# Altium footprint library Package_DFN_QFN.PcbLib: 735 footprints (part 32 of 46)
Each footprint in its own frame and in the unit in brackets; x right, y up, seen from the top. Pads: shape width x height; smd on the part's side, far side on the other; paste and mask are expansions set on the pad; w line width, h text height; cw(c..) or ccw(c..) is an arc to the next point about the centre after c.
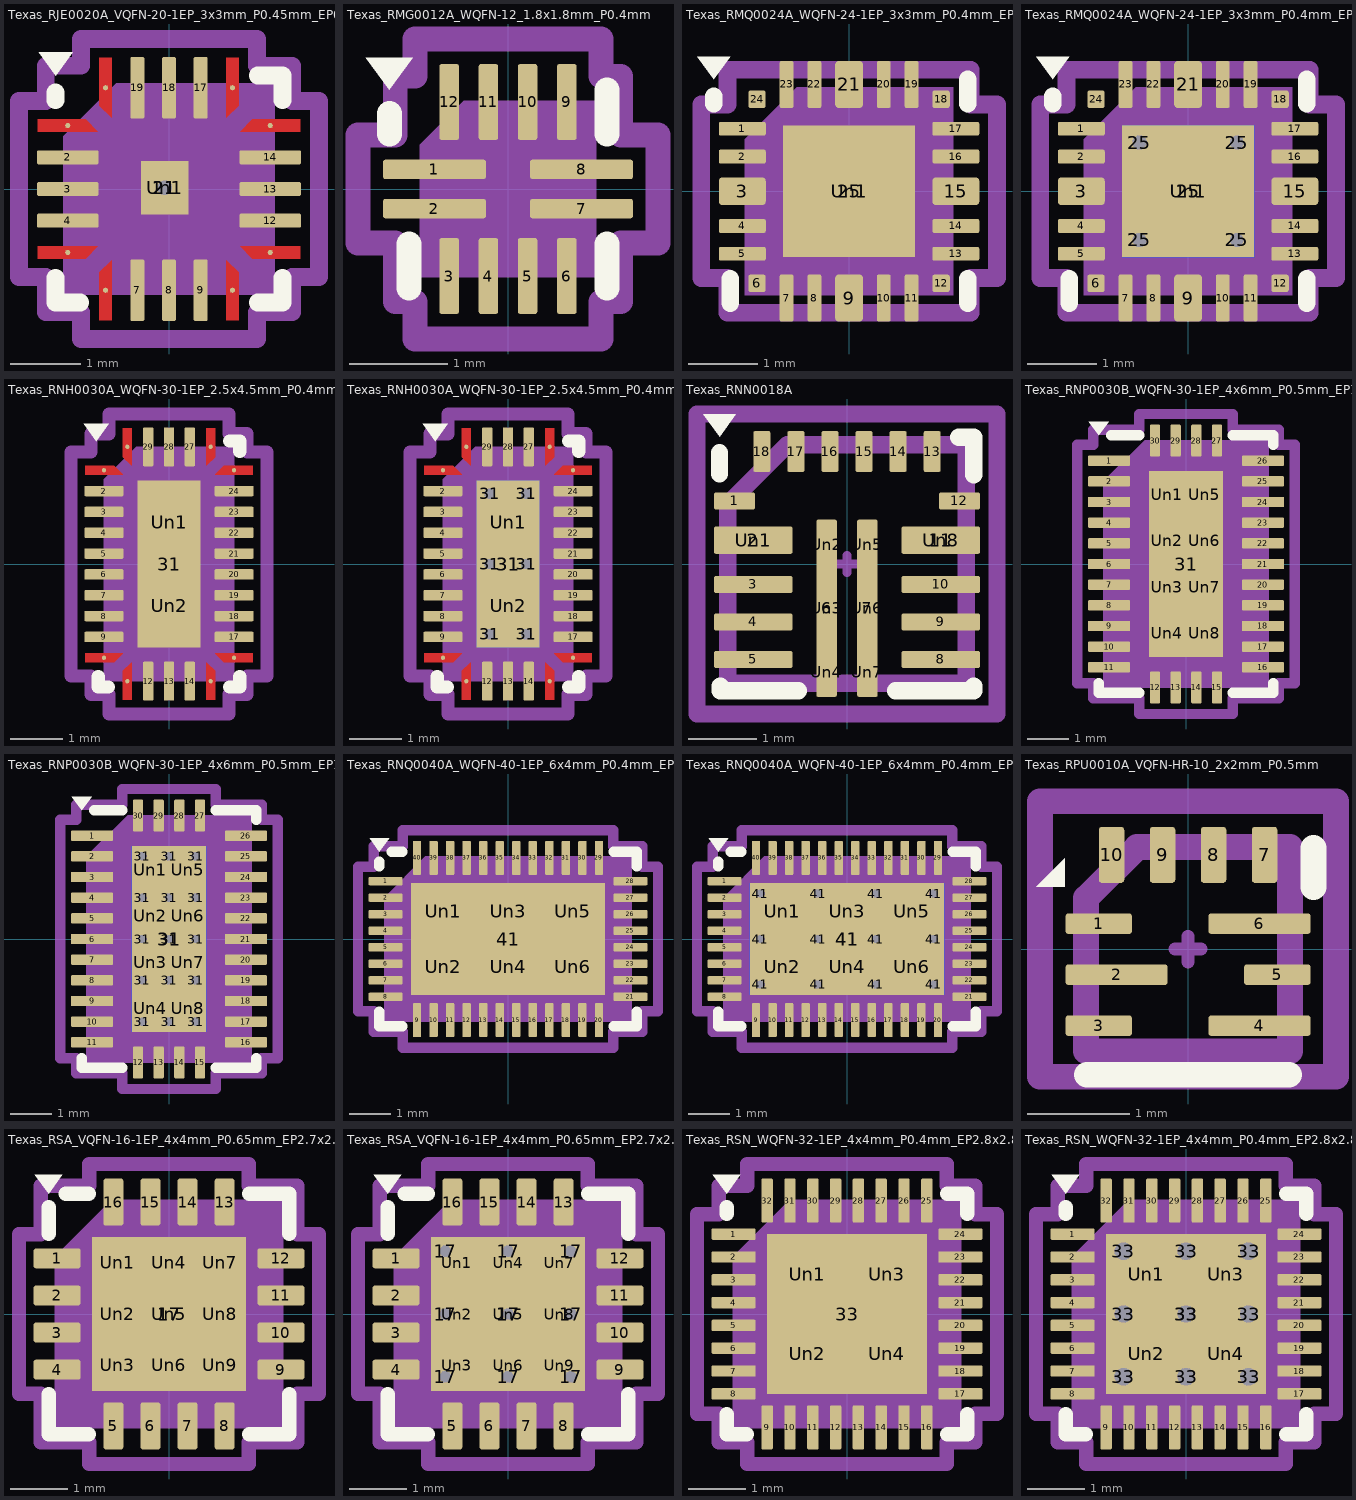
[diagram p31: the footprints below, top view; thin cyan lines are the x and y axes]

## Texas_RJE0020A_VQFN-20-1EP_3x3mm_P0.45mm_EP0.675x0.76mm_ThermalVias [mm] "Texas_RJE0020A_VQFN-20-1EP_3x3mm_P0.45mm_EP0.675x0.76mm_ThermalVias"
pads (24):
  round 0.073 smd: 1(-1.438,0.9) 5(-1.438,-0.9) 6(-0.9,-1.438) 10(0.9,-1.438) 11(1.438,-0.9) 15(1.438,0.9) 16(0.9,1.438) 20(-0.9,1.438)
  rrect25% 0.875x0.2 smd: 2(-1.438,0.45) 3(-1.438,0) 4(-1.438,-0.45) 12(1.438,-0.45) 13(1.438,0) 14(1.438,0.45)
  rrect25% 0.2x0.875 smd: 7(-0.45,-1.438) 8(0,-1.438) 9(0.45,-1.438) 17(0.45,1.438) 18(0,1.438) 19(-0.45,1.438)
  rect 0.675x0.76 smd: 21(-0.06,0.018)
  round 0.5 hole 0.2: 21(-0.06,0.018)
  rect 0.5x0.5 smd far side: 21(-0.06,0.018)
  rrect25% 0.64x0.72 on Top Paste: Un1(-0.06,0.018)
F.Cu:
  region: -1.01,0.816 -1.01,0.81 -1.865,0.81 -1.865,0.99 -1.184,0.99
  region: -1.01,-0.816 -1.184,-0.99 -1.865,-0.99 -1.865,-0.81 -1.01,-0.81
  region: -0.81,-1.865 -0.99,-1.865 -0.99,-1.184 -0.816,-1.01 -0.81,-1.01
  region: 0.99,-1.184 0.99,-1.865 0.81,-1.865 0.81,-1.01 0.816,-1.01
  region: 1.865,-0.99 1.184,-0.99 1.01,-0.816 1.01,-0.81 1.865,-0.81
  region: 1.865,0.81 1.01,0.81 1.01,0.816 1.184,0.99 1.865,0.99
  region: 0.99,1.184 0.816,1.01 0.81,1.01 0.81,1.865 0.99,1.865
  region: -0.81,1.01 -0.816,1.01 -0.99,1.184 -0.99,1.865 -0.81,1.865
F.SilkS:
  region: -1.61,1.61 -1.85,1.94 -1.37,1.94
  lines w0.254: -1.61,-1.26 -1.61,-1.61 -1.26,-1.61 ; -1.61,1.26 -1.61,1.37 ; 1.26,-1.61 1.61,-1.61 1.61,-1.26 ; 1.26,1.61 1.61,1.61 1.61,1.26
F.Paste:
  region: -1.01,0.816 -1.01,0.81 -1.865,0.81 -1.865,0.99 -1.184,0.99
  region: -1.01,-0.816 -1.184,-0.99 -1.865,-0.99 -1.865,-0.81 -1.01,-0.81
  region: -0.81,-1.865 -0.99,-1.865 -0.99,-1.184 -0.816,-1.01 -0.81,-1.01
  region: 0.99,-1.184 0.99,-1.865 0.81,-1.865 0.81,-1.01 0.816,-1.01
  region: 1.865,-0.99 1.184,-0.99 1.01,-0.816 1.01,-0.81 1.865,-0.81
  region: 1.865,0.81 1.01,0.81 1.01,0.816 1.184,0.99 1.865,0.99
  region: 0.99,1.184 0.816,1.01 0.81,1.01 0.81,1.865 0.99,1.865
  region: -0.81,1.01 -0.816,1.01 -0.99,1.184 -0.99,1.865 -0.81,1.865
F.Mask:
  region: -1.01,0.816 -1.01,0.81 -1.865,0.81 -1.865,0.99 -1.184,0.99
  region: -1.01,-0.816 -1.184,-0.99 -1.865,-0.99 -1.865,-0.81 -1.01,-0.81
  region: -0.81,-1.865 -0.99,-1.865 -0.99,-1.184 -0.816,-1.01 -0.81,-1.01
  region: 0.99,-1.184 0.99,-1.865 0.81,-1.865 0.81,-1.01 0.816,-1.01
  region: 1.865,-0.99 1.184,-0.99 1.01,-0.816 1.01,-0.81 1.865,-0.81
  region: 1.865,0.81 1.01,0.81 1.01,0.816 1.184,0.99 1.865,0.99
  region: 0.99,1.184 0.816,1.01 0.81,1.01 0.81,1.865 0.99,1.865
  region: -0.81,1.01 -0.816,1.01 -0.99,1.184 -0.99,1.865 -0.81,1.865
Top Component Center:
  lines w0.127: -0.127,0 0.127,0 -0.127,0 ; 0,-0.127 0,0.127 0,-0.127
Top Assembly:
  region: 1.5,-1.5 -1.5,-1.5 -1.5,0.75 -0.75,1.5 1.5,1.5
Top Courtyard:
  lines w0.254: -2.13,-1.25 -2.13,1.25 -1.75,1.25 -1.75,1.75 -1.25,1.75 -1.25,2.13 1.25,2.13 1.25,1.75 1.75,1.75 1.75,1.25 2.13,1.25 2.13,-1.25 1.75,-1.25 1.75,-1.75 1.25,-1.75 1.25,-2.13 -1.25,-2.13 -1.25,-1.75 -1.75,-1.75 -1.75,-1.25 -2.13,-1.25
Top Designator:
  text ".Designator" at -3.43,-0.344 h1.52

## Texas_RMG0012A_WQFN-12_1.8x1.8mm_P0.4mm [mm] "Texas_RMG0012A_WQFN-12_1.8x1.8mm_P0.4mm"
pads (12):
  rrect25% 1.05x0.2 smd: 1(-0.75,0.2) 2(-0.75,-0.2) 7(0.75,-0.2) 8(0.75,0.2)
  rrect25% 0.2x0.775 smd: 3(-0.6,-0.887) 4(-0.2,-0.887) 5(0.2,-0.887) 6(0.6,-0.887) 9(0.6,0.887) 10(0.2,0.887) 11(-0.2,0.887) 12(-0.6,0.887)
F.SilkS:
  region: -1.21,1.01 -1.45,1.34 -0.97,1.34
  lines w0.254: -1.21,0.56 -1.21,0.77 ; -1.01,-1.01 -1.01,-0.56 ; 1.01,-1.01 1.01,-0.56 ; 1.01,0.56 1.01,1.01
Top Component Center:
  lines w0.127: -0.127,0 0.127,0 -0.127,0 ; 0,-0.127 0,0.127 0,-0.127
Top Assembly:
  region: 0.9,-0.9 -0.9,-0.9 -0.9,0.45 -0.45,0.9 0.9,0.9
Top Courtyard:
  lines w0.254: -1.53,-0.55 -1.15,-0.55 -1.15,-1.15 -0.95,-1.15 -0.95,-1.53 0.95,-1.53 0.95,-1.15 1.15,-1.15 1.15,-0.55 1.53,-0.55 1.53,0.55 1.15,0.55 1.15,1.15 0.95,1.15 0.95,1.53 -0.95,1.53 -0.95,1.15 -1.15,1.15 -1.15,0.55 -1.53,0.55 -1.53,-0.55
Top Designator:
  text ".Designator" at -3.43,-0.344 h1.52

## Texas_RMQ0024A_WQFN-24-1EP_3x3mm_P0.4mm_EP1.9x1.9mm [mm] "Texas_RMQ0024A_WQFN-24-1EP_3x3mm_P0.4mm_EP1.9x1.9mm"
pads (26):
  rrect25% 0.675x0.2 smd: 1(-1.538,0.9) 2(-1.538,0.5) 4(-1.538,-0.5) 5(-1.538,-0.9) 13(1.538,-0.9) 14(1.538,-0.5) 16(1.538,0.5) 17(1.538,0.9)
  rrect25% 0.675x0.4 smd: 3(-1.538,0) 15(1.538,0)
  rrect25% 0.25x0.25 smd: 6(-1.325,-1.325) 12(1.325,-1.325) 18(1.325,1.325) 24(-1.325,1.325)
  rrect25% 0.2x0.675 smd: 7(-0.9,-1.538) 8(-0.5,-1.538) 10(0.5,-1.538) 11(0.9,-1.538) 19(0.9,1.538) 20(0.5,1.538) 22(-0.5,1.538) 23(-0.9,1.538)
  rrect25% 0.4x0.675 smd: 9(0,-1.538) 21(0,1.538)
  rect 1.9x1.9 smd: 25(0,0)
  rrect16% 1.53x1.53 on Top Paste: Un1(0,0)
F.SilkS:
  region: -1.95,1.61 -2.19,1.94 -1.71,1.94
  lines w0.254: -1.95,1.26 -1.95,1.37 ; -1.71,-1.61 -1.71,-1.26 ; 1.71,-1.61 1.71,-1.26 ; 1.71,1.26 1.71,1.61
Top Component Center:
  lines w0.127: -0.127,0 0.127,0 -0.127,0 ; 0,-0.127 0,0.127 0,-0.127
Top Assembly:
  region: 1.5,-1.5 -1.5,-1.5 -1.5,0.75 -0.75,1.5 1.5,1.5
Top Courtyard:
  lines w0.254: -2.13,-1.25 -1.75,-1.25 -1.75,-1.75 1.75,-1.75 1.75,-1.25 2.13,-1.25 2.13,1.25 1.75,1.25 1.75,1.75 -1.75,1.75 -1.75,1.25 -2.13,1.25 -2.13,-1.25
Top Designator:
  text ".Designator" at -3.43,-0.344 h1.52

## Texas_RMQ0024A_WQFN-24-1EP_3x3mm_P0.4mm_EP1.9x1.9mm_ThermalVias [mm] "Texas_RMQ0024A_WQFN-24-1EP_3x3mm_P0.4mm_EP1.9x1.9mm_ThermalVias"
pads (31):
  rrect25% 0.675x0.2 smd: 1(-1.538,0.9) 2(-1.538,0.5) 4(-1.538,-0.5) 5(-1.538,-0.9) 13(1.538,-0.9) 14(1.538,-0.5) 16(1.538,0.5) 17(1.538,0.9)
  rrect25% 0.675x0.4 smd: 3(-1.538,0) 15(1.538,0)
  rrect25% 0.25x0.25 smd: 6(-1.325,-1.325) 12(1.325,-1.325) 18(1.325,1.325) 24(-1.325,1.325)
  rrect25% 0.2x0.675 smd: 7(-0.9,-1.538) 8(-0.5,-1.538) 10(0.5,-1.538) 11(0.9,-1.538) 19(0.9,1.538) 20(0.5,1.538) 22(-0.5,1.538) 23(-0.9,1.538)
  rrect25% 0.4x0.675 smd: 9(0,-1.538) 21(0,1.538)
  round 0.5 hole 0.2: 25(-0.7,-0.7) 25(-0.7,0.7) 25(0.7,-0.7) 25(0.7,0.7)
  rect 1.9x1.9 smd: 25(0,0)
  rect 1.9x1.9 smd far side: 25(0,0)
  rrect15% 1.71x1.71 on Top Paste: Un1(0,0)
F.SilkS:
  region: -1.95,1.61 -2.19,1.94 -1.71,1.94
  lines w0.254: -1.95,1.26 -1.95,1.37 ; -1.71,-1.61 -1.71,-1.26 ; 1.71,-1.61 1.71,-1.26 ; 1.71,1.26 1.71,1.61
Top Component Center:
  lines w0.127: -0.127,0 0.127,0 -0.127,0 ; 0,-0.127 0,0.127 0,-0.127
Top Assembly:
  region: 1.5,-1.5 -1.5,-1.5 -1.5,0.75 -0.75,1.5 1.5,1.5
Top Courtyard:
  lines w0.254: -2.13,-1.25 -1.75,-1.25 -1.75,-1.75 1.75,-1.75 1.75,-1.25 2.13,-1.25 2.13,1.25 1.75,1.25 1.75,1.75 -1.75,1.75 -1.75,1.25 -2.13,1.25 -2.13,-1.25
Top Designator:
  text ".Designator" at -3.43,-0.344 h1.52

## Texas_RNH0030A_WQFN-30-1EP_2.5x4.5mm_P0.4mm_EP1.2x3.2mm [mm] "Texas_RNH0030A_WQFN-30-1EP_2.5x4.5mm_P0.4mm_EP1.2x3.2mm"
pads (33):
  round 0.082 smd: 1(-1.25,1.8) 10(-1.25,-1.8) 11(-0.8,-2.25) 15(0.8,-2.25) 16(1.25,-1.8) 25(1.25,1.8) 26(0.8,2.25) 30(-0.8,2.25)
  rrect25% 0.75x0.2 smd: 2(-1.25,1.4) 3(-1.25,1) 4(-1.25,0.6) 5(-1.25,0.2) 6(-1.25,-0.2) 7(-1.25,-0.6) 8(-1.25,-1) 9(-1.25,-1.4) 17(1.25,-1.4) 18(1.25,-1) 19(1.25,-0.6) 20(1.25,-0.2) 21(1.25,0.2) 22(1.25,0.6) 23(1.25,1) 24(1.25,1.4)
  rrect25% 0.2x0.75 smd: 12(-0.4,-2.25) 13(0,-2.25) 14(0.4,-2.25) 27(0.4,2.25) 28(0,2.25) 29(-0.4,2.25)
  rect 1.2x3.2 smd: 31(0,0)
  rrect23% 1.09x1.45 on Top Paste: Un1(0,0.8) Un2(0,-0.8)
F.Cu:
  region: -0.717,1.891 -0.726,1.891 -0.884,2.049 -0.884,2.609 -0.717,2.609
  region: 0.884,2.049 0.726,1.891 0.717,1.891 0.717,2.609 0.884,2.609
  region: 1.609,1.716 0.891,1.716 0.891,1.726 1.049,1.883 1.609,1.883
  region: 1.609,-1.883 1.049,-1.883 0.891,-1.726 0.891,-1.716 1.609,-1.716
  region: 0.884,-2.049 0.884,-2.609 0.717,-2.609 0.717,-1.891 0.726,-1.891
  region: -0.717,-2.609 -0.884,-2.609 -0.884,-2.049 -0.726,-1.891 -0.717,-1.891
  region: -0.891,-1.726 -1.049,-1.883 -1.609,-1.883 -1.609,-1.716 -0.891,-1.716
  region: -0.891,1.726 -0.891,1.716 -1.609,1.716 -1.609,1.883 -1.049,1.883
F.SilkS:
  region: -1.4,2.36 -1.64,2.69 -1.16,2.69
  lines w0.254: -1.36,-2.16 -1.36,-2.36 -1.16,-2.36 ; 1.16,-2.36 1.36,-2.36 1.36,-2.16 ; 1.16,2.36 1.36,2.36 1.36,2.16
F.Paste:
  region: -0.717,1.891 -0.726,1.891 -0.884,2.049 -0.884,2.609 -0.717,2.609
  region: 0.884,2.049 0.726,1.891 0.717,1.891 0.717,2.609 0.884,2.609
  region: 1.609,1.716 0.891,1.716 0.891,1.726 1.049,1.883 1.609,1.883
  region: 1.609,-1.883 1.049,-1.883 0.891,-1.726 0.891,-1.716 1.609,-1.716
  region: 0.884,-2.049 0.884,-2.609 0.717,-2.609 0.717,-1.891 0.726,-1.891
  region: -0.717,-2.609 -0.884,-2.609 -0.884,-2.049 -0.726,-1.891 -0.717,-1.891
  region: -0.891,-1.726 -1.049,-1.883 -1.609,-1.883 -1.609,-1.716 -0.891,-1.716
  region: -0.891,1.726 -0.891,1.716 -1.609,1.716 -1.609,1.883 -1.049,1.883
F.Mask:
  region: -0.717,1.891 -0.726,1.891 -0.884,2.049 -0.884,2.609 -0.717,2.609
  region: 0.884,2.049 0.726,1.891 0.717,1.891 0.717,2.609 0.884,2.609
  region: 1.609,1.716 0.891,1.716 0.891,1.726 1.049,1.883 1.609,1.883
  region: 1.609,-1.883 1.049,-1.883 0.891,-1.726 0.891,-1.716 1.609,-1.716
  region: 0.884,-2.049 0.884,-2.609 0.717,-2.609 0.717,-1.891 0.726,-1.891
  region: -0.717,-2.609 -0.884,-2.609 -0.884,-2.049 -0.726,-1.891 -0.717,-1.891
  region: -0.891,-1.726 -1.049,-1.883 -1.609,-1.883 -1.609,-1.716 -0.891,-1.716
  region: -0.891,1.726 -0.891,1.716 -1.609,1.716 -1.609,1.883 -1.049,1.883
Top Component Center:
  lines w0.127: -0.127,0 0.127,0 -0.127,0 ; 0,-0.127 0,0.127 0,-0.127
Top Assembly:
  region: 1.25,-2.25 -1.25,-2.25 -1.25,1.625 -0.625,2.25 1.25,2.25
Top Courtyard:
  lines w0.254: -1.88,-2.15 -1.5,-2.15 -1.5,-2.5 -1.15,-2.5 -1.15,-2.88 1.15,-2.88 1.15,-2.5 1.5,-2.5 1.5,-2.15 1.88,-2.15 1.88,2.15 1.5,2.15 1.5,2.5 1.15,2.5 1.15,2.88 -1.15,2.88 -1.15,2.5 -1.5,2.5 -1.5,2.15 -1.88,2.15 -1.88,-2.15
Top Designator:
  text ".Designator" at -3.43,-0.344 h1.52

## Texas_RNH0030A_WQFN-30-1EP_2.5x4.5mm_P0.4mm_EP1.2x3.2mm_ThermalVias [mm] "Texas_RNH0030A_WQFN-30-1EP_2.5x4.5mm_P0.4mm_EP1.2x3.2mm_ThermalVias"
pads (40):
  round 0.082 smd: 1(-1.25,1.8) 10(-1.25,-1.8) 11(-0.8,-2.25) 15(0.8,-2.25) 16(1.25,-1.8) 25(1.25,1.8) 26(0.8,2.25) 30(-0.8,2.25)
  rrect25% 0.75x0.2 smd: 2(-1.25,1.4) 3(-1.25,1) 4(-1.25,0.6) 5(-1.25,0.2) 6(-1.25,-0.2) 7(-1.25,-0.6) 8(-1.25,-1) 9(-1.25,-1.4) 17(1.25,-1.4) 18(1.25,-1) 19(1.25,-0.6) 20(1.25,-0.2) 21(1.25,0.2) 22(1.25,0.6) 23(1.25,1) 24(1.25,1.4)
  rrect25% 0.2x0.75 smd: 12(-0.4,-2.25) 13(0,-2.25) 14(0.4,-2.25) 27(0.4,2.25) 28(0,2.25) 29(-0.4,2.25)
  round 0.5 hole 0.2: 31(-0.35,-1.35) 31(-0.35,0) 31(-0.35,1.35) 31(0.35,-1.35) 31(0.35,0) 31(0.35,1.35)
  rect 1.2x3.2 smd: 31(0,0)
  rect 1.2x3.2 smd far side: 31(0,0)
  rrect23% 1.09x1.45 on Top Paste: Un1(0,0.8) Un2(0,-0.8)
F.Cu:
  region: -0.717,1.891 -0.726,1.891 -0.884,2.049 -0.884,2.609 -0.717,2.609
  region: 0.884,2.049 0.726,1.891 0.717,1.891 0.717,2.609 0.884,2.609
  region: 1.609,1.716 0.891,1.716 0.891,1.726 1.049,1.883 1.609,1.883
  region: 1.609,-1.883 1.049,-1.883 0.891,-1.726 0.891,-1.716 1.609,-1.716
  region: 0.884,-2.049 0.884,-2.609 0.717,-2.609 0.717,-1.891 0.726,-1.891
  region: -0.717,-2.609 -0.884,-2.609 -0.884,-2.049 -0.726,-1.891 -0.717,-1.891
  region: -0.891,-1.726 -1.049,-1.883 -1.609,-1.883 -1.609,-1.716 -0.891,-1.716
  region: -0.891,1.726 -0.891,1.716 -1.609,1.716 -1.609,1.883 -1.049,1.883
F.SilkS:
  region: -1.4,2.36 -1.64,2.69 -1.16,2.69
  lines w0.254: -1.36,-2.16 -1.36,-2.36 -1.16,-2.36 ; 1.16,-2.36 1.36,-2.36 1.36,-2.16 ; 1.16,2.36 1.36,2.36 1.36,2.16
F.Paste:
  region: -0.717,1.891 -0.726,1.891 -0.884,2.049 -0.884,2.609 -0.717,2.609
  region: 0.884,2.049 0.726,1.891 0.717,1.891 0.717,2.609 0.884,2.609
  region: 1.609,1.716 0.891,1.716 0.891,1.726 1.049,1.883 1.609,1.883
  region: 1.609,-1.883 1.049,-1.883 0.891,-1.726 0.891,-1.716 1.609,-1.716
  region: 0.884,-2.049 0.884,-2.609 0.717,-2.609 0.717,-1.891 0.726,-1.891
  region: -0.717,-2.609 -0.884,-2.609 -0.884,-2.049 -0.726,-1.891 -0.717,-1.891
  region: -0.891,-1.726 -1.049,-1.883 -1.609,-1.883 -1.609,-1.716 -0.891,-1.716
  region: -0.891,1.726 -0.891,1.716 -1.609,1.716 -1.609,1.883 -1.049,1.883
F.Mask:
  region: -0.717,1.891 -0.726,1.891 -0.884,2.049 -0.884,2.609 -0.717,2.609
  region: 0.884,2.049 0.726,1.891 0.717,1.891 0.717,2.609 0.884,2.609
  region: 1.609,1.716 0.891,1.716 0.891,1.726 1.049,1.883 1.609,1.883
  region: 1.609,-1.883 1.049,-1.883 0.891,-1.726 0.891,-1.716 1.609,-1.716
  region: 0.884,-2.049 0.884,-2.609 0.717,-2.609 0.717,-1.891 0.726,-1.891
  region: -0.717,-2.609 -0.884,-2.609 -0.884,-2.049 -0.726,-1.891 -0.717,-1.891
  region: -0.891,-1.726 -1.049,-1.883 -1.609,-1.883 -1.609,-1.716 -0.891,-1.716
  region: -0.891,1.726 -0.891,1.716 -1.609,1.716 -1.609,1.883 -1.049,1.883
Top Component Center:
  lines w0.127: -0.127,0 0.127,0 -0.127,0 ; 0,-0.127 0,0.127 0,-0.127
Top Assembly:
  region: 1.25,-2.25 -1.25,-2.25 -1.25,1.625 -0.625,2.25 1.25,2.25
Top Courtyard:
  lines w0.254: -1.88,-2.15 -1.5,-2.15 -1.5,-2.5 -1.15,-2.5 -1.15,-2.88 1.15,-2.88 1.15,-2.5 1.5,-2.5 1.5,-2.15 1.88,-2.15 1.88,2.15 1.5,2.15 1.5,2.5 1.15,2.5 1.15,2.88 -1.15,2.88 -1.15,2.5 -1.5,2.5 -1.5,2.15 -1.88,2.15 -1.88,-2.15
Top Designator:
  text ".Designator" at -3.43,-0.344 h1.52

## Texas_RNN0018A [mm] "Texas_RNN0018A"
pads (26):
  rrect20% 0.6x0.25 smd: 1(-1.65,0.925) 12(1.65,0.925)
  rrect12% 1.15x0.4 smd: 2(-1.375,0.35) 11(1.375,0.35)
  rrect20% 1.15x0.25 smd: 3(-1.375,-0.3) 4(-1.375,-0.85) 5(-1.375,-1.4) 8(1.375,-1.4) 9(1.375,-0.85) 10(1.375,-0.3)
  rrect17% 0.3x2.6 smd: 6(-0.3,-0.65) 7(0.3,-0.65)
  rrect20% 0.25x0.6 smd: 13(1.25,1.65) 14(0.75,1.65) 15(0.25,1.65) 16(-0.25,1.65) 17(-0.75,1.65) 18(-1.25,1.65)
  rrect14% 1.15x0.36 on Top Paste: Un1(-1.375,0.35) Un8(1.375,0.35)
  rrect17% 0.3x0.733 on Top Paste: Un2(-0.3,0.282) Un3(-0.3,-0.651) Un4(-0.3,-1.585) Un5(0.3,0.282) Un6(0.3,-0.651) Un7(0.3,-1.585)
F.SilkS:
  region: -1.87,1.87 -2.11,2.2 -1.63,2.2
  lines w0.254: -1.87,1.32 -1.87,1.63 ; -1.86,-1.79 -1.86,-1.86 -0.71,-1.86 ; 0.71,-1.86 1.86,-1.86 1.86,-1.79 ; 1.64,1.86 1.86,1.86 1.86,1.31
Top Component Center:
  lines w0.127: -0.127,0 0.127,0 -0.127,0 ; 0,-0.127 0,0.127 0,-0.127
Top Assembly:
  lines w0.254: -1.75,-1.75 1.75,-1.75 1.75,1.75 -0.875,1.75 -1.75,0.875 -1.75,-1.75
Top Courtyard:
  lines w0.254: -2.2,-2.2 2.2,-2.2 2.2,2.2 -2.2,2.2 -2.2,-2.2
Top Designator:
  text ".Designator" at -3.43,-0.344 h1.52

## Texas_RNP0030B_WQFN-30-1EP_4x6mm_P0.5mm_EP1.8x4.5mm [mm] "Texas_RNP0030B_WQFN-30-1EP_4x6mm_P0.5mm_EP1.8x4.5mm"
pads (39):
  rrect25% 1.025x0.25 smd: 1(-1.863,2.5) 2(-1.863,2) 3(-1.863,1.5) 4(-1.863,1) 5(-1.863,0.5) 6(-1.863,0) 7(-1.863,-0.5) 8(-1.863,-1) 9(-1.863,-1.5) 10(-1.863,-2) 11(-1.863,-2.5) 16(1.863,-2.5) 17(1.863,-2) 18(1.863,-1.5) 19(1.863,-1) 20(1.863,-0.5) 21(1.863,0) 22(1.863,0.5) 23(1.863,1) 24(1.863,1.5) 25(1.863,2) 26(1.863,2.5)
  rrect25% 0.25x0.775 smd: 12(-0.75,-2.987) 13(-0.25,-2.987) 14(0.25,-2.987) 15(0.75,-2.987) 27(0.75,2.987) 28(0.25,2.987) 29(-0.25,2.987) 30(-0.75,2.987)
  rect 1.8x4.5 smd: 31(0,0)
  rrect25% 0.73x0.91 on Top Paste: Un1(-0.45,1.68) Un2(-0.45,0.56) Un3(-0.45,-0.56) Un4(-0.45,-1.68) Un5(0.45,1.68) Un6(0.45,0.56) Un7(0.45,-0.56) Un8(0.45,-1.68)
F.SilkS:
  region: -2.11,3.11 -2.35,3.44 -1.87,3.44
  lines w0.254: -2.11,-2.885 -2.11,-3.11 -1.135,-3.11 ; -1.81,3.11 -1.135,3.11 ; 1.135,-3.11 2.11,-3.11 2.11,-2.885 ; 1.135,3.11 2.11,3.11 2.11,2.885
Top Component Center:
  lines w0.127: -0.127,0 0.127,0 -0.127,0 ; 0,-0.127 0,0.127 0,-0.127
Top Assembly:
  region: 2,-3 -2,-3 -2,2 -1,3 2,3
Top Courtyard:
  lines w0.254: -2.63,-2.88 -2.25,-2.88 -2.25,-3.25 -1.13,-3.25 -1.13,-3.63 1.13,-3.63 1.13,-3.25 2.25,-3.25 2.25,-2.88 2.63,-2.88 2.63,2.88 2.25,2.88 2.25,3.25 1.13,3.25 1.13,3.63 -1.13,3.63 -1.13,3.25 -2.25,3.25 -2.25,2.88 -2.63,2.88 -2.63,-2.88
Top Designator:
  text ".Designator" at -3.43,-0.344 h1.52

## Texas_RNP0030B_WQFN-30-1EP_4x6mm_P0.5mm_EP1.8x4.5mm_ThermalVias [mm] "Texas_RNP0030B_WQFN-30-1EP_4x6mm_P0.5mm_EP1.8x4.5mm_ThermalVias"
pads (55):
  rrect25% 1.025x0.25 smd: 1(-1.863,2.5) 2(-1.863,2) 3(-1.863,1.5) 4(-1.863,1) 5(-1.863,0.5) 6(-1.863,0) 7(-1.863,-0.5) 8(-1.863,-1) 9(-1.863,-1.5) 10(-1.863,-2) 11(-1.863,-2.5) 16(1.863,-2.5) 17(1.863,-2) 18(1.863,-1.5) 19(1.863,-1) 20(1.863,-0.5) 21(1.863,0) 22(1.863,0.5) 23(1.863,1) 24(1.863,1.5) 25(1.863,2) 26(1.863,2.5)
  rrect25% 0.25x0.775 smd: 12(-0.75,-2.987) 13(-0.25,-2.987) 14(0.25,-2.987) 15(0.75,-2.987) 27(0.75,2.987) 28(0.25,2.987) 29(-0.25,2.987) 30(-0.75,2.987)
  round 0.5 hole 0.2: 31(-0.65,-2) 31(-0.65,-1) 31(-0.65,0) 31(-0.65,1) 31(-0.65,2) 31(0,-2) 31(0,-1) 31(0,0) 31(0,1) 31(0,2) 31(0.65,-2) 31(0.65,-1) 31(0.65,0) 31(0.65,1) 31(0.65,2)
  rect 1.8x4.5 smd: 31(0,0)
  rect 1.8x4.5 smd far side: 31(0,0)
  rrect25% 0.78x0.97 on Top Paste: Un1(-0.45,1.68) Un2(-0.45,0.56) Un3(-0.45,-0.56) Un4(-0.45,-1.68) Un5(0.45,1.68) Un6(0.45,0.56) Un7(0.45,-0.56) Un8(0.45,-1.68)
F.SilkS:
  region: -2.11,3.11 -2.35,3.44 -1.87,3.44
  lines w0.254: -2.11,-2.885 -2.11,-3.11 -1.135,-3.11 ; -1.81,3.11 -1.135,3.11 ; 1.135,-3.11 2.11,-3.11 2.11,-2.885 ; 1.135,3.11 2.11,3.11 2.11,2.885
Top Component Center:
  lines w0.127: -0.127,0 0.127,0 -0.127,0 ; 0,-0.127 0,0.127 0,-0.127
Top Assembly:
  region: 2,-3 -2,-3 -2,2 -1,3 2,3
Top Courtyard:
  lines w0.254: -2.63,-2.88 -2.25,-2.88 -2.25,-3.25 -1.13,-3.25 -1.13,-3.63 1.13,-3.63 1.13,-3.25 2.25,-3.25 2.25,-2.88 2.63,-2.88 2.63,2.88 2.25,2.88 2.25,3.25 1.13,3.25 1.13,3.63 -1.13,3.63 -1.13,3.25 -2.25,3.25 -2.25,2.88 -2.63,2.88 -2.63,-2.88
Top Designator:
  text ".Designator" at -3.43,-0.344 h1.52

## Texas_RNQ0040A_WQFN-40-1EP_6x4mm_P0.4mm_EP4.7x2.7mm [mm] "Texas_RNQ0040A_WQFN-40-1EP_6x4mm_P0.4mm_EP4.7x2.7mm"
pads (47):
  rrect25% 0.825x0.2 smd: 1(-2.963,1.4) 2(-2.963,1) 3(-2.963,0.6) 4(-2.963,0.2) 5(-2.963,-0.2) 6(-2.963,-0.6) 7(-2.963,-1) 8(-2.963,-1.4) 21(2.963,-1.4) 22(2.963,-1) 23(2.963,-0.6) 24(2.963,-0.2) 25(2.963,0.2) 26(2.963,0.6) 27(2.963,1) 28(2.963,1.4)
  rrect25% 0.2x0.825 smd: 9(-2.2,-1.963) 10(-1.8,-1.963) 11(-1.4,-1.963) 12(-1,-1.963) 13(-0.6,-1.963) 14(-0.2,-1.963) 15(0.2,-1.963) 16(0.6,-1.963) 17(1,-1.963) 18(1.4,-1.963) 19(1.8,-1.963) 20(2.2,-1.963) 29(2.2,1.963) 30(1.8,1.963) 31(1.4,1.963) 32(1,1.963) 33(0.6,1.963) 34(0.2,1.963) 35(-0.2,1.963) 36(-0.6,1.963) 37(-1,1.963) 38(-1.4,1.963) 39(-1.8,1.963) 40(-2.2,1.963)
  rect 4.7x2.7 smd: 41(0,0)
  rrect22% 1.34x1.15 on Top Paste: Un1(-1.57,0.675) Un2(-1.57,-0.675) Un3(0,0.675) Un4(0,-0.675) Un5(1.57,0.675) Un6(1.57,-0.675)
F.SilkS:
  region: -3.11,2.11 -3.35,2.44 -2.87,2.44
  lines w0.254: -3.11,-1.76 -3.11,-2.11 -2.56,-2.11 ; -3.11,1.76 -3.11,1.87 ; -2.81,2.11 -2.56,2.11 ; 2.56,-2.11 3.11,-2.11 3.11,-1.76 ; 2.56,2.11 3.11,2.11 3.11,1.76
Top Component Center:
  lines w0.127: -0.127,0 0.127,0 -0.127,0 ; 0,-0.127 0,0.127 0,-0.127
Top Assembly:
  region: 3,-2 -3,-2 -3,1 -2,2 3,2
Top Courtyard:
  lines w0.254: -3.63,-1.75 -3.25,-1.75 -3.25,-2.25 -2.55,-2.25 -2.55,-2.63 2.55,-2.63 2.55,-2.25 3.25,-2.25 3.25,-1.75 3.63,-1.75 3.63,1.75 3.25,1.75 3.25,2.25 2.55,2.25 2.55,2.63 -2.55,2.63 -2.55,2.25 -3.25,2.25 -3.25,1.75 -3.63,1.75 -3.63,-1.75
Top Designator:
  text ".Designator" at -3.43,-0.344 h1.52

## Texas_RNQ0040A_WQFN-40-1EP_6x4mm_P0.4mm_EP4.7x2.7mm_ThermalVias [mm] "Texas_RNQ0040A_WQFN-40-1EP_6x4mm_P0.4mm_EP4.7x2.7mm_ThermalVias"
pads (60):
  rrect25% 0.825x0.2 smd: 1(-2.963,1.4) 2(-2.963,1) 3(-2.963,0.6) 4(-2.963,0.2) 5(-2.963,-0.2) 6(-2.963,-0.6) 7(-2.963,-1) 8(-2.963,-1.4) 21(2.963,-1.4) 22(2.963,-1) 23(2.963,-0.6) 24(2.963,-0.2) 25(2.963,0.2) 26(2.963,0.6) 27(2.963,1) 28(2.963,1.4)
  rrect25% 0.2x0.825 smd: 9(-2.2,-1.963) 10(-1.8,-1.963) 11(-1.4,-1.963) 12(-1,-1.963) 13(-0.6,-1.963) 14(-0.2,-1.963) 15(0.2,-1.963) 16(0.6,-1.963) 17(1,-1.963) 18(1.4,-1.963) 19(1.8,-1.963) 20(2.2,-1.963) 29(2.2,1.963) 30(1.8,1.963) 31(1.4,1.963) 32(1,1.963) 33(0.6,1.963) 34(0.2,1.963) 35(-0.2,1.963) 36(-0.6,1.963) 37(-1,1.963) 38(-1.4,1.963) 39(-1.8,1.963) 40(-2.2,1.963)
  round 0.5 hole 0.2: 41(-2.1,-1.1) 41(-2.1,0) 41(-2.1,1.1) 41(-0.7,-1.1) 41(-0.7,0) 41(-0.7,1.1) 41(0.7,-1.1) 41(0.7,0) 41(0.7,1.1) 41(2.1,-1.1) 41(2.1,0) 41(2.1,1.1)
  rect 4.7x2.7 smd: 41(0,0)
  rect 4.7x2.7 smd far side: 41(0,0)
  rrect22% 1.34x1.15 on Top Paste: Un1(-1.57,0.675) Un2(-1.57,-0.675) Un3(0,0.675) Un4(0,-0.675) Un5(1.57,0.675) Un6(1.57,-0.675)
F.SilkS:
  region: -3.11,2.11 -3.35,2.44 -2.87,2.44
  lines w0.254: -3.11,-1.76 -3.11,-2.11 -2.56,-2.11 ; -3.11,1.76 -3.11,1.87 ; -2.81,2.11 -2.56,2.11 ; 2.56,-2.11 3.11,-2.11 3.11,-1.76 ; 2.56,2.11 3.11,2.11 3.11,1.76
Top Component Center:
  lines w0.127: -0.127,0 0.127,0 -0.127,0 ; 0,-0.127 0,0.127 0,-0.127
Top Assembly:
  region: 3,-2 -3,-2 -3,1 -2,2 3,2
Top Courtyard:
  lines w0.254: -3.63,-1.75 -3.63,1.75 -3.25,1.75 -3.25,2.25 -2.55,2.25 -2.55,2.63 2.55,2.63 2.55,2.25 3.25,2.25 3.25,1.75 3.63,1.75 3.63,-1.75 3.25,-1.75 3.25,-2.25 2.55,-2.25 2.55,-2.63 -2.55,-2.63 -2.55,-2.25 -3.25,-2.25 -3.25,-1.75 -3.63,-1.75
Top Designator:
  text ".Designator" at -3.43,-0.344 h1.52

## Texas_RPU0010A_VQFN-HR-10_2x2mm_P0.5mm [mm] "Texas_RPU0010A_VQFN-HR-10_2x2mm_P0.5mm"
pads (10):
  rrect25% 0.65x0.2 smd: 1(-0.875,0.25) 3(-0.875,-0.75) 5(0.875,-0.25)
  rrect25% 1x0.2 smd: 2(-0.7,-0.25) 4(0.7,-0.75) 6(0.7,0.25)
  rrect25% 0.25x0.55 smd: 7(0.75,0.925) 8(0.25,0.925) 9(-0.25,0.925) 10(-0.75,0.925)
F.SilkS:
  region: -1.21,0.61 -1.49,0.61 -1.21,0.89
  lines w0.254: -0.99,-1.23 0.99,-1.23 ; 1.23,0.61 1.23,0.99
Top Component Center:
  lines w0.127: -0.127,0 0.127,0 -0.127,0 ; 0,-0.127 0,0.127 0,-0.127
Top Assembly:
  lines w0.254: -1,-1 -1,0.5 -0.5,1 1,1 1,-1 -1,-1
Top Courtyard:
  lines w0.254: -1.45,-1.25 -1.45,1.45 1.45,1.45 1.45,-1.25 -1.45,-1.25
Top Designator:
  text ".Designator" at -3.43,-0.344 h1.52

## Texas_RSA_VQFN-16-1EP_4x4mm_P0.65mm_EP2.7x2.7mm [mm] "Texas_RSA_VQFN-16-1EP_4x4mm_P0.65mm_EP2.7x2.7mm"
pads (26):
  rrect25% 0.825x0.35 smd: 1(-1.963,0.975) 2(-1.963,0.325) 3(-1.963,-0.325) 4(-1.963,-0.975) 9(1.963,-0.975) 10(1.963,-0.325) 11(1.963,0.325) 12(1.963,0.975)
  rrect25% 0.35x0.825 smd: 5(-0.975,-1.963) 6(-0.325,-1.963) 7(0.325,-1.963) 8(0.975,-1.963) 13(0.975,1.963) 14(0.325,1.963) 15(-0.325,1.963) 16(-0.975,1.963)
  rect 2.7x2.7 smd: 17(0,0)
  rrect25% 0.73x0.73 on Top Paste: Un1(-0.9,0.9) Un2(-0.9,0) Un3(-0.9,-0.9) Un4(0,0.9) Un5(0,0) Un6(0,-0.9) Un7(0.9,0.9) Un8(0.9,0) Un9(0.9,-0.9)
F.SilkS:
  region: -2.11,2.11 -2.35,2.44 -1.87,2.44
  lines w0.254: -2.11,-1.41 -2.11,-2.11 -1.41,-2.11 ; -2.11,1.41 -2.11,1.87 ; -1.81,2.11 -1.41,2.11 ; 1.41,-2.11 2.11,-2.11 2.11,-1.41 ; 1.41,2.11 2.11,2.11 2.11,1.41
Top Component Center:
  lines w0.127: -0.127,0 0.127,0 -0.127,0 ; 0,-0.127 0,0.127 0,-0.127
Top Assembly:
  region: 2,-2 -2,-2 -2,1 -1,2 2,2
Top Courtyard:
  lines w0.254: -2.63,-1.4 -2.25,-1.4 -2.25,-2.25 -1.4,-2.25 -1.4,-2.63 1.4,-2.63 1.4,-2.25 2.25,-2.25 2.25,-1.4 2.63,-1.4 2.63,1.4 2.25,1.4 2.25,2.25 1.4,2.25 1.4,2.63 -1.4,2.63 -1.4,2.25 -2.25,2.25 -2.25,1.4 -2.63,1.4 -2.63,-1.4
Top Designator:
  text ".Designator" at -3.43,-0.344 h1.52
3D body "Texas_RSA_VQFN-16-1EP_4x4mm_P0.65mm_EP2.7x2.7mm.step": height 0.8, standoff 0, extent -2,-2 2,2

## Texas_RSA_VQFN-16-1EP_4x4mm_P0.65mm_EP2.7x2.7mm_ThermalVias [mm] "Texas_RSA_VQFN-16-1EP_4x4mm_P0.65mm_EP2.7x2.7mm_ThermalVias"
pads (36):
  rrect25% 0.825x0.35 smd: 1(-1.963,0.975) 2(-1.963,0.325) 3(-1.963,-0.325) 4(-1.963,-0.975) 9(1.963,-0.975) 10(1.963,-0.325) 11(1.963,0.325) 12(1.963,0.975)
  rrect25% 0.35x0.825 smd: 5(-0.975,-1.963) 6(-0.325,-1.963) 7(0.325,-1.963) 8(0.975,-1.963) 13(0.975,1.963) 14(0.325,1.963) 15(-0.325,1.963) 16(-0.975,1.963)
  round 0.5 hole 0.2: 17(-1.1,-1.1) 17(-1.1,0) 17(-1.1,1.1) 17(0,-1.1) 17(0,0) 17(0,1.1) 17(1.1,-1.1) 17(1.1,0) 17(1.1,1.1)
  rect 2.7x2.7 smd: 17(0,0)
  rect 2.7x2.7 smd far side: 17(0,0)
  rrect25% 0.64x0.64 on Top Paste: Un1(-0.9,0.9) Un2(-0.9,0) Un3(-0.9,-0.9) Un4(0,0.9) Un5(0,0) Un6(0,-0.9) Un7(0.9,0.9) Un8(0.9,0) Un9(0.9,-0.9)
F.SilkS:
  region: -2.11,2.11 -2.35,2.44 -1.87,2.44
  lines w0.254: -2.11,-1.41 -2.11,-2.11 -1.41,-2.11 ; -2.11,1.41 -2.11,1.87 ; -1.81,2.11 -1.41,2.11 ; 1.41,-2.11 2.11,-2.11 2.11,-1.41 ; 1.41,2.11 2.11,2.11 2.11,1.41
Top Component Center:
  lines w0.127: -0.127,0 0.127,0 -0.127,0 ; 0,-0.127 0,0.127 0,-0.127
Top Assembly:
  region: 2,-2 -2,-2 -2,1 -1,2 2,2
Top Courtyard:
  lines w0.254: -2.63,-1.4 -2.25,-1.4 -2.25,-2.25 -1.4,-2.25 -1.4,-2.63 1.4,-2.63 1.4,-2.25 2.25,-2.25 2.25,-1.4 2.63,-1.4 2.63,1.4 2.25,1.4 2.25,2.25 1.4,2.25 1.4,2.63 -1.4,2.63 -1.4,2.25 -2.25,2.25 -2.25,1.4 -2.63,1.4 -2.63,-1.4
Top Designator:
  text ".Designator" at -3.43,-0.344 h1.52
3D body "Texas_RSA_VQFN-16-1EP_4x4mm_P0.65mm_EP2.7x2.7mm.step": height 0.8, standoff 0, extent -2,-2 2,2

## Texas_RSN_WQFN-32-1EP_4x4mm_P0.4mm_EP2.8x2.8mm [mm] "Texas_RSN_WQFN-32-1EP_4x4mm_P0.4mm_EP2.8x2.8mm"
pads (37):
  rrect25% 0.775x0.2 smd: 1(-1.987,1.4) 2(-1.987,1) 3(-1.987,0.6) 4(-1.987,0.2) 5(-1.987,-0.2) 6(-1.987,-0.6) 7(-1.987,-1) 8(-1.987,-1.4) 17(1.987,-1.4) 18(1.987,-1) 19(1.987,-0.6) 20(1.987,-0.2) 21(1.987,0.2) 22(1.987,0.6) 23(1.987,1) 24(1.987,1.4)
  rrect25% 0.2x0.775 smd: 9(-1.4,-1.987) 10(-1,-1.987) 11(-0.6,-1.987) 12(-0.2,-1.987) 13(0.2,-1.987) 14(0.6,-1.987) 15(1,-1.987) 16(1.4,-1.987) 25(1.4,1.987) 26(1,1.987) 27(0.6,1.987) 28(0.2,1.987) 29(-0.2,1.987) 30(-0.6,1.987) 31(-1,1.987) 32(-1.4,1.987)
  rect 2.8x2.8 smd: 33(0,0)
  rrect22% 1.13x1.13 on Top Paste: Un1(-0.7,0.7) Un2(-0.7,-0.7) Un3(0.7,0.7) Un4(0.7,-0.7)
F.SilkS:
  region: -2.11,2.11 -2.35,2.44 -1.87,2.44
  lines w0.254: -2.11,-1.76 -2.11,-2.11 -1.76,-2.11 ; -2.11,1.76 -2.11,1.87 ; 1.76,-2.11 2.11,-2.11 2.11,-1.76 ; 1.76,2.11 2.11,2.11 2.11,1.76
Top Component Center:
  lines w0.127: -0.127,0 0.127,0 -0.127,0 ; 0,-0.127 0,0.127 0,-0.127
Top Assembly:
  region: 2,-2 -2,-2 -2,1 -1,2 2,2
Top Courtyard:
  lines w0.254: -2.63,-1.75 -2.63,1.75 -2.25,1.75 -2.25,2.25 -1.75,2.25 -1.75,2.63 1.75,2.63 1.75,2.25 2.25,2.25 2.25,1.75 2.63,1.75 2.63,-1.75 2.25,-1.75 2.25,-2.25 1.75,-2.25 1.75,-2.63 -1.75,-2.63 -1.75,-2.25 -2.25,-2.25 -2.25,-1.75 -2.63,-1.75
Top Designator:
  text ".Designator" at -3.43,-0.344 h1.52

## Texas_RSN_WQFN-32-1EP_4x4mm_P0.4mm_EP2.8x2.8mm_ThermalVias [mm] "Texas_RSN_WQFN-32-1EP_4x4mm_P0.4mm_EP2.8x2.8mm_ThermalVias"
pads (47):
  rrect25% 0.775x0.2 smd: 1(-1.987,1.4) 2(-1.987,1) 3(-1.987,0.6) 4(-1.987,0.2) 5(-1.987,-0.2) 6(-1.987,-0.6) 7(-1.987,-1) 8(-1.987,-1.4) 17(1.987,-1.4) 18(1.987,-1) 19(1.987,-0.6) 20(1.987,-0.2) 21(1.987,0.2) 22(1.987,0.6) 23(1.987,1) 24(1.987,1.4)
  rrect25% 0.2x0.775 smd: 9(-1.4,-1.987) 10(-1,-1.987) 11(-0.6,-1.987) 12(-0.2,-1.987) 13(0.2,-1.987) 14(0.6,-1.987) 15(1,-1.987) 16(1.4,-1.987) 25(1.4,1.987) 26(1,1.987) 27(0.6,1.987) 28(0.2,1.987) 29(-0.2,1.987) 30(-0.6,1.987) 31(-1,1.987) 32(-1.4,1.987)
  round 0.6 hole 0.3: 33(-1.1,-1.1) 33(-1.1,0) 33(-1.1,1.1) 33(0,-1.1) 33(0,0) 33(0,1.1) 33(1.1,-1.1) 33(1.1,0) 33(1.1,1.1)
  rect 2.8x2.8 smd: 33(0,0)
  rect 2.8x2.8 smd far side: 33(0,0)
  rrect21% 1.17x1.17 on Top Paste: Un1(-0.7,0.7) Un2(-0.7,-0.7) Un3(0.7,0.7) Un4(0.7,-0.7)
F.SilkS:
  region: -2.11,2.11 -2.35,2.44 -1.87,2.44
  lines w0.254: -2.11,-1.76 -2.11,-2.11 -1.76,-2.11 ; -2.11,1.76 -2.11,1.87 ; 1.76,-2.11 2.11,-2.11 2.11,-1.76 ; 1.76,2.11 2.11,2.11 2.11,1.76
Top Component Center:
  lines w0.127: -0.127,0 0.127,0 -0.127,0 ; 0,-0.127 0,0.127 0,-0.127
Top Assembly:
  region: 2,-2 -2,-2 -2,1 -1,2 2,2
Top Courtyard:
  lines w0.254: -2.63,-1.75 -2.25,-1.75 -2.25,-2.25 -1.75,-2.25 -1.75,-2.63 1.75,-2.63 1.75,-2.25 2.25,-2.25 2.25,-1.75 2.63,-1.75 2.63,1.75 2.25,1.75 2.25,2.25 1.75,2.25 1.75,2.63 -1.75,2.63 -1.75,2.25 -2.25,2.25 -2.25,1.75 -2.63,1.75 -2.63,-1.75
Top Designator:
  text ".Designator" at -3.43,-0.344 h1.52